# Altium schematic symbol library 0494001.NR.SchLib: 1 symbol
Pins are listed as number, name and electrical type; pins without a type are passive.

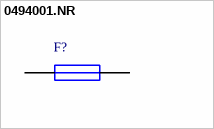
[diagram p0: symbol 0494001.NR]

## 0494001.NR
designator F?
Surface Mount Fuses 32V 1A Case 0603 Protector Slim; Manufacturer_Name: LITTELFUSE; Geometry.Height: 0.305mm; Mouser Part Number: 576-0494001.NR; Mouser Price/Stock: https://www.mouser.co.uk/ProductDetail/Littelfuse/0494001.NR?qs=zMpzAB%2FftDevS%252BkFabf%252B6Q%3D%3D; Manufacturer_Part_Number: 0494001.NR; Datasheet Link: https://datasheet.lcsc.com/szlcsc/Littelfuse-0494001-NR_C142652.pdf
footprint FUSC1608X30N
pins: 1, 2